# Altium footprint library PB_.PcbLib: 8 footprints
Each footprint in its own frame and in the unit in brackets; x right, y up, seen from the top. Pads: shape width x height; smd on the part's side, far side on the other; paste and mask are expansions set on the pad; w line width, h text height; cw(c..) or ccw(c..) is an arc to the next point about the centre after c.
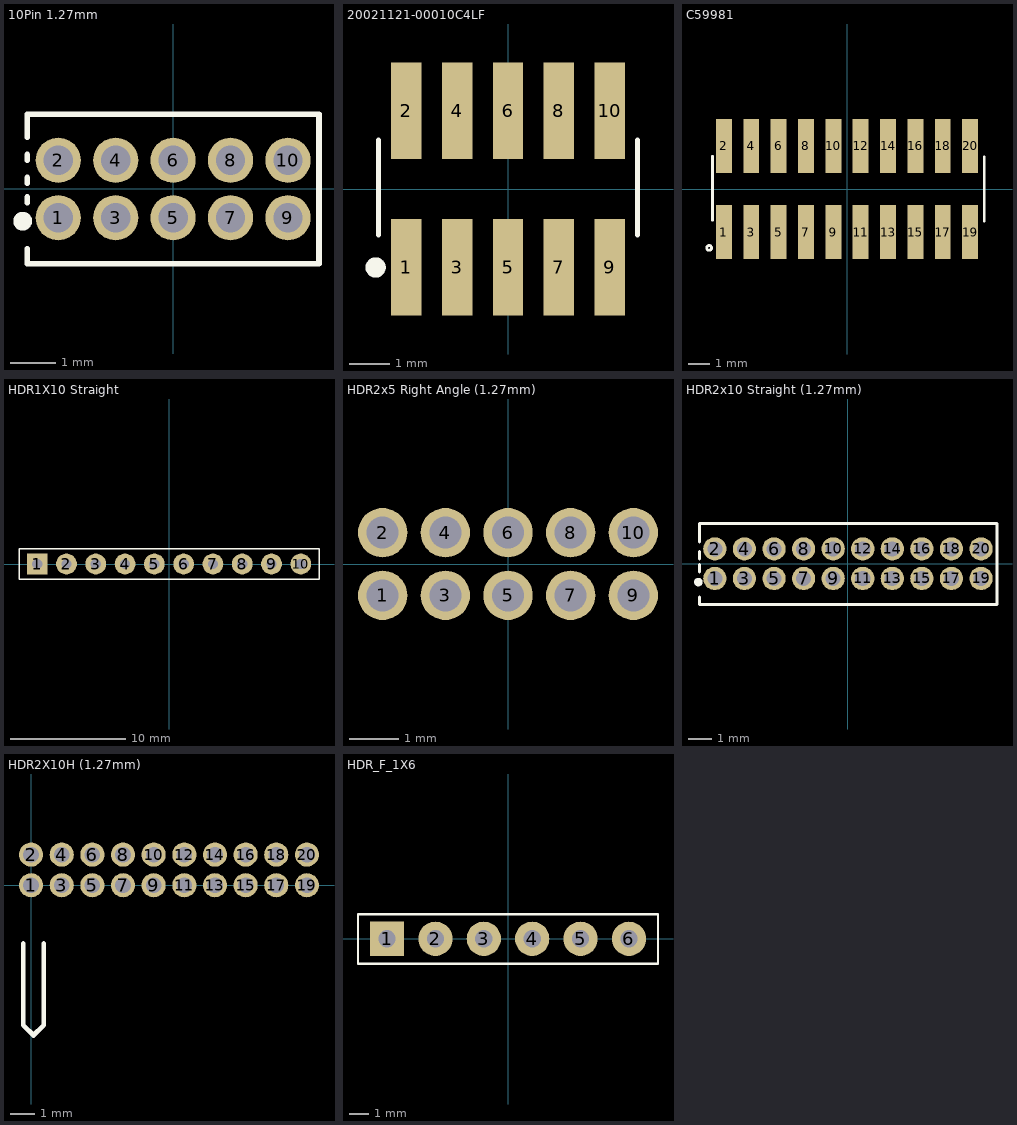
[diagram p0: the footprints below, top view; thin cyan lines are the x and y axes]

## 10Pin 1.27mm [mm] "Male header 1.27mm 5x2 10-Pin"
pads (10):
  round 1 hole 0.65: 1(-2.54,-0.635) 2(-2.54,0.635) 3(-1.27,-0.635) 4(-1.27,0.635) 5(0,-0.635) 6(0,0.635) 7(1.27,-0.635) 8(1.27,0.635) 9(2.54,-0.635) 10(2.54,0.635)
Top Overlay:
  circle w0.254: c-3.327,-0.711 r0.08
  lines w0.127: -3.226,-1.321 -3.226,-1.651 3.2,-1.651 ; -3.226,-0.305 -3.226,-0.178 ; -3.226,0.127 -3.226,0.254 ; -3.226,0.635 -3.226,0.762 ; -3.226,1.143 -3.226,1.651 3.226,1.651 3.226,-1.651
3D body "STEP-62201021121-rev1.stp": height 5.31, standoff -2.29, extent -3.175,-1.7 3.175,1.7

## 20021121-00010C4LF [mm]
pads (10):
  rect 0.76x2.4 smd: 1(-2.54,-1.95) 2(-2.54,1.95) 3(-1.27,-1.95) 4(-1.27,1.95) 5(0,-1.95) 6(0,1.95) 7(1.27,-1.95) 8(1.27,1.95) 9(2.54,-1.95) 10(2.54,1.95)
Top Overlay:
  circle w0.254: c-3.302,-1.956 r0.127
  lines w0.127: -3.226,-1.143 -3.226,1.219 ; 3.226,-1.143 3.226,1.219
3D body "User Library-RM127_10pin_Header.step": height 4.5, standoff 0, extent -3.175,-2.782 3.175,2.718

## C59981 [mm]
pads (20):
  rect 0.74x2.5 smd: 1(-5.715,-2) 2(-5.715,2) 3(-4.445,-2) 4(-4.445,2) 5(-3.175,-2) 6(-3.175,2) 7(-1.905,-2) 8(-1.905,2) 9(-0.635,-2) 10(-0.635,2) 11(0.635,-2) 12(0.635,2) 13(1.905,-2) 14(1.905,2) 15(3.175,-2) 16(3.175,2) 17(4.445,-2) 18(4.445,2) 19(5.715,-2) 20(5.715,2)
Top Overlay:
  circle w0.127: c-6.401,-2.737 r0.114
  lines w0.127: -6.248,-1.452 -6.248,1.516 ; 6.375,-1.484 6.375,1.484
3D body "M50-3601042.STEP": height 4.65, standoff -0.03, extent -6.388,-2.756 6.312,2.744

## HDR1X10 Straight [mm]
pads (10):
  rect 1.8x1.8 hole 0.9: 1(-11.43,0)
  round 1.8 hole 0.9: 2(-8.89,0) 3(-6.35,0) 4(-3.81,0) 5(-1.27,0) 6(1.27,0) 7(3.81,0) 8(6.35,0) 9(8.89,0) 10(11.43,0)
Top Overlay:
  lines w0.127: -13.005,-1.321 -13.005,1.321 13.005,1.321 13.005,-1.321 -13.005,-1.321
3D body "User Library-zl262-10s_p2-54_l25-9_w2-54_h8-5.step": height 8.7, standoff -2.8, extent -12.95,-1.27 12.95,1.27

## HDR2x5 Right Angle (1.27mm) [mm]
pads (10):
  round 1 hole 0.65: 1(-2.54,-0.635) 2(-2.54,0.635) 3(-1.27,-0.635) 4(-1.27,0.635) 5(0,-0.635) 6(0,0.635) 7(1.27,-0.635) 8(1.27,0.635) 9(2.54,-0.635) 10(2.54,0.635)
3D body "BB02-BD101-XA3-383000_rev2.7.STEP": height 3.6, standoff -2.8, extent -3.175,-7.538 3.175,0.832

## HDR2x10 Straight (1.27mm) [mm]
pads (20):
  round 1 hole 0.65: 1(-5.715,-0.635) 2(-5.715,0.635) 3(-4.445,-0.635) 4(-4.445,0.635) 5(-3.175,-0.635) 6(-3.175,0.635) 7(-1.905,-0.635) 8(-1.905,0.635) 9(-0.635,-0.635) 10(-0.635,0.635) 11(0.635,-0.635) 12(0.635,0.635) 13(1.905,-0.635) 14(1.905,0.635) 15(3.175,-0.635) 16(3.175,0.635) 17(4.445,-0.635) 18(4.445,0.635) 19(5.715,-0.635) 20(5.715,0.635)
Top Overlay:
  circle w0.254: c-6.426,-0.787 r0.057
  lines w0.127: -6.375,-1.422 -6.375,-1.753 6.401,-1.753 6.401,1.727 -6.375,1.727 -6.375,0.94 ; -6.375,-0.356 -6.375,-0.025 ; -6.375,0.203 -6.375,0.533
3D body "Pin header 2x10 TH pitch 1.27mm.stp": height 5.51, standoff -2.09, extent -6.35,-1.7 6.35,1.7

## HDR2X10H (1.27mm) [mm] "Connector; Header; 10x2 Position; Right Angle"
pads (20):
  round 1 hole 0.65: 1(0,0) 2(0,1.27) 3(1.27,0) 4(1.27,1.27) 5(2.54,0) 6(2.54,1.27) 7(3.81,0) 8(3.81,1.27) 9(5.08,0) 10(5.08,1.27) 11(6.35,0) 12(6.35,1.27) 13(7.62,0) 14(7.62,1.27) 15(8.89,0) 16(8.89,1.27) 17(10.16,0) 18(10.16,1.27) 19(11.43,0) 20(11.43,1.27)
Top Overlay:
  lines w0.2: -0.322,-2.413 -0.322,-5.8 0.102,-6.223 0.525,-5.8 0.525,-2.413

## HDR_F_1X6 [mm]
pads (6):
  rect 1.8x1.8 hole 0.9: 1(-6.35,0)
  round 1.8 hole 0.9: 2(-3.81,0) 3(-1.27,0) 4(1.27,0) 5(3.81,0) 6(6.35,0)
Top Overlay:
  lines w0.127: -7.874,-1.321 -7.874,1.295 7.874,1.295 7.874,-1.321 -7.874,-1.321
3D body "User Library-zl262-6s_p2-54_l15-74_w2-54_h8-5.step": height 8.6, standoff -2.9, extent -7.87,-1.27 7.87,1.27